# Altium footprint library SOP127P600X170-14N.PcbLib: 1 footprints
Each footprint in its own frame and in the unit in brackets; x right, y up, seen from the top. Pads: shape width x height; smd on the part's side, far side on the other; paste and mask are expansions set on the pad; w line width, h text height; cw(c..) or ccw(c..) is an arc to the next point about the centre after c.
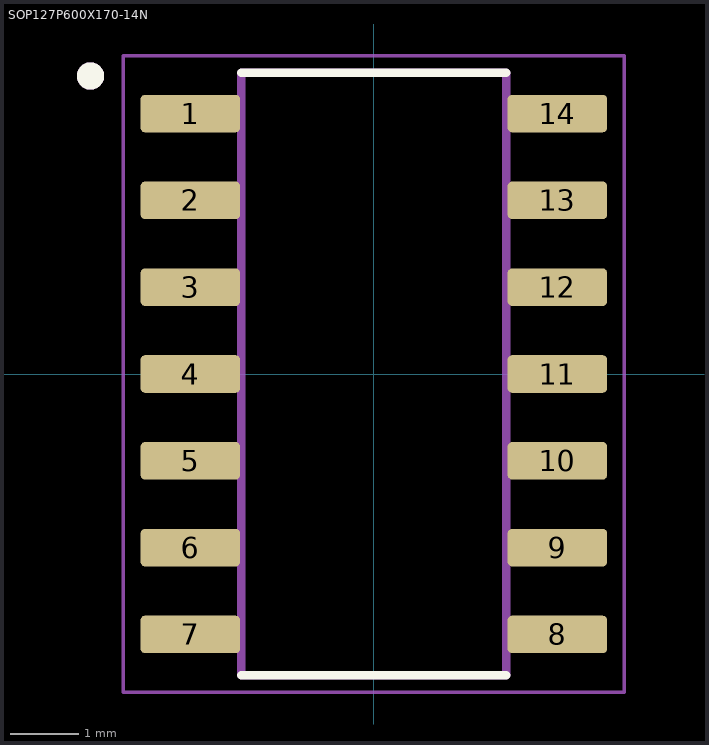
[diagram p0: the footprint, top view; thin cyan lines are the x and y axes]

## SOP127P600X170-14N [mm]
height 1.7
pads (14):
  rrect25% 1.46x0.55 smd paste+0 mask+0.102: 1(-2.685,3.81) 2(-2.685,2.54) 3(-2.685,1.27) 4(-2.685,0) 5(-2.685,-1.27) 6(-2.685,-2.54) 7(-2.685,-3.81) 8(2.685,-3.81) 9(2.685,-2.54) 10(2.685,-1.27) 11(2.685,0) 12(2.685,1.27) 13(2.685,2.54) 14(2.685,3.81)
Top Overlay:
  circle w0.2: c-4.145,4.36 r0.1
  lines w0.127: -1.937,-4.405 1.937,-4.405 ; -1.937,4.405 1.937,4.405
Assembly Top:
  circle w0.2: c-4.145,4.36 r0.1
  lines w0.127: -1.937,-4.405 1.937,-4.405 1.937,4.405 -1.937,4.405 -1.937,-4.405
Courtyard Top:
  lines w0.05: -3.665,-4.655 3.665,-4.655 3.665,4.655 -3.665,4.655 -3.665,-4.655
3D body "step_temp.STEP": height 1.7, standoff 0, extent -3,-4.405 3,4.405